# Altium footprint library Mechanical.PcbLib: 23 footprints (part 1 of 2)
Each footprint in its own frame and in the unit in brackets; x right, y up, seen from the top. Pads: shape width x height; smd on the part's side, far side on the other; paste and mask are expansions set on the pad; w line width, h text height; cw(c..) or ccw(c..) is an arc to the next point about the centre after c.
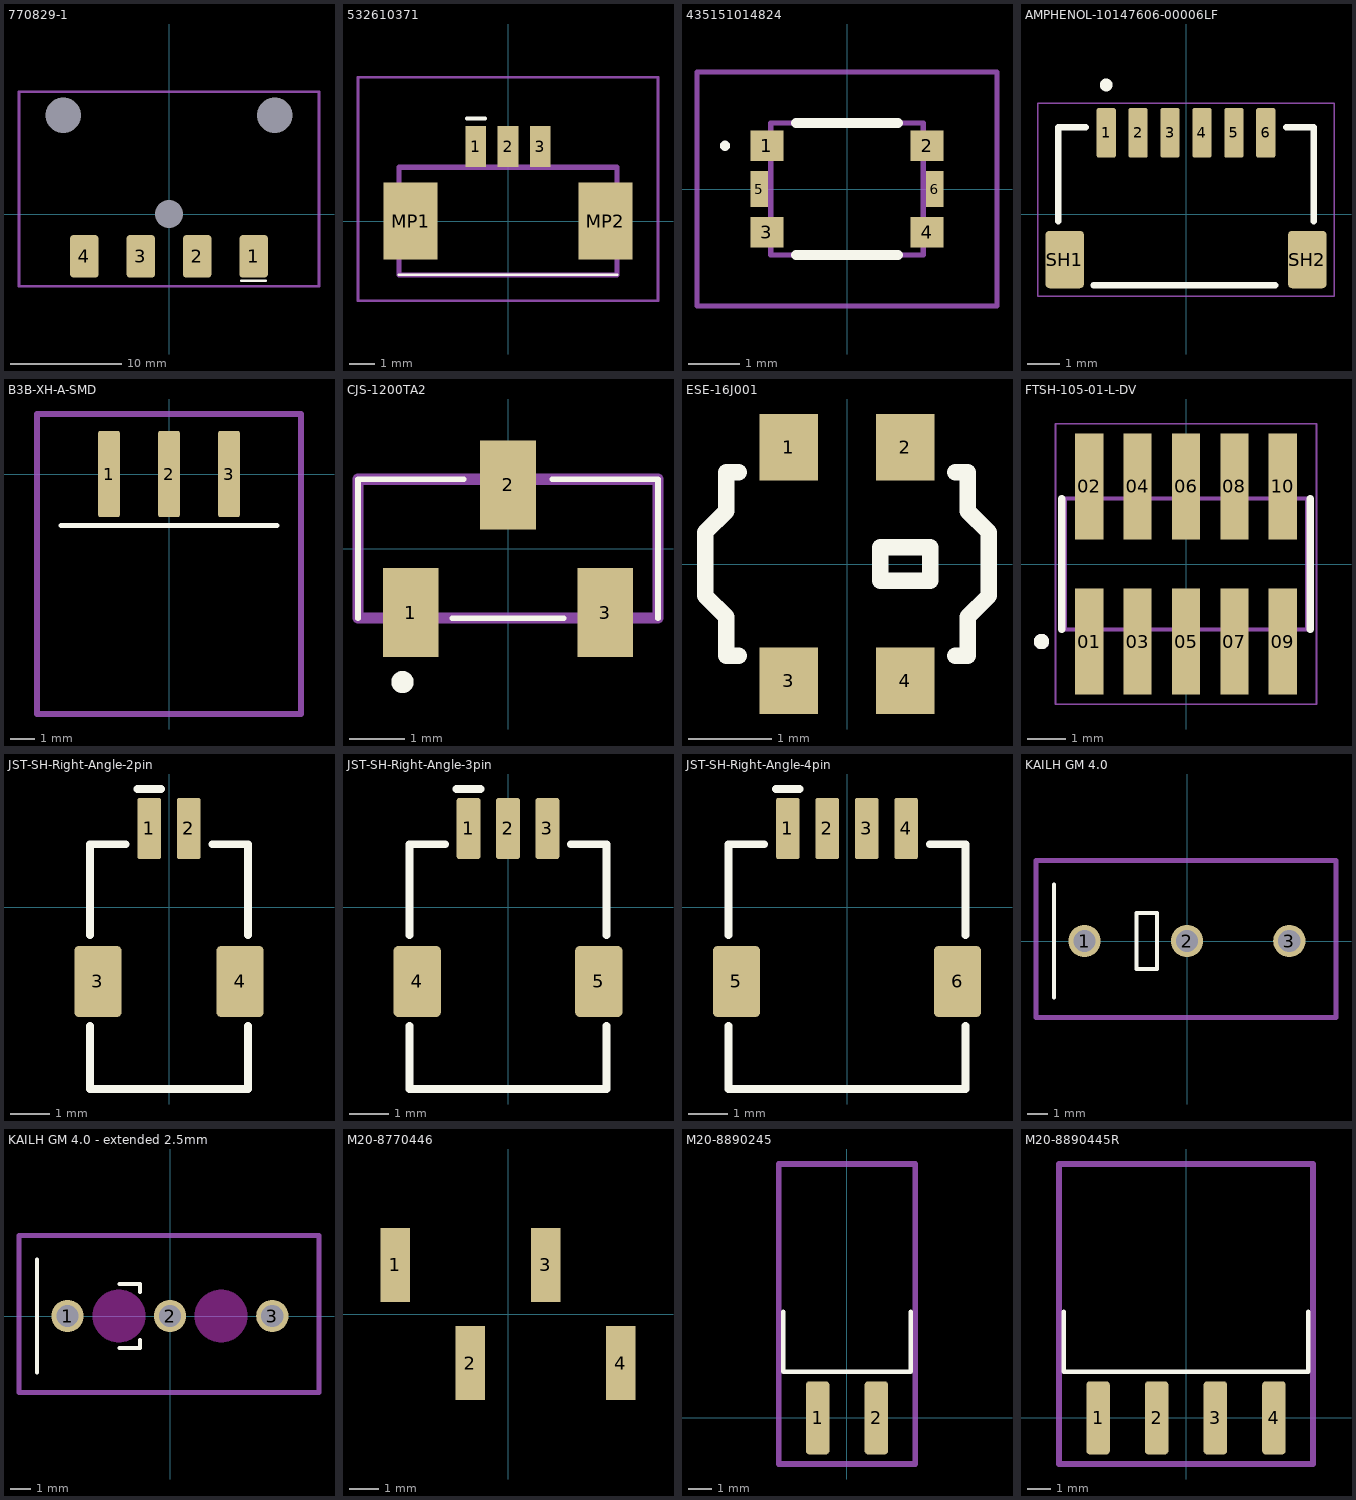
[diagram p0: the footprints below, top view; thin cyan lines are the x and y axes]

## 770829-1 [mm] "Connector Header Surface Mount, Right Angle 4 position 0.200\" (5.08mm)"
pads (7):
  rrect20% 2.54x3.8 smd mask+0.05: 1(7.62,-3.81) 2(2.54,-3.81) 3(-2.54,-3.81) 4(-7.62,-3.81)
  round 0 hole 3.18 mask+0: 7(-9.53,8.89) 7(9.53,8.89)
  round 0 hole 2.54 mask+0: 7(0,0)
Top Overlay:
  lines w0.254: 6.5,-6 8.7,-6
Mechanical 15:
  lines w0.254: -13.5,-6.5 13.5,-6.5 13.5,11 -13.5,11 -13.5,-6.5
3D body "770829-1.stp": height 8.59, standoff -3.68, extent -12.7,-5.042 12.7,10.3

## 532610371 [mm] "Headers & Wire Housings 1.25MM HDR 3 CKT Right-Angle"
pads (5):
  rect 0.8x1.6 smd mask+0.035: 1(-1.25,2.9) 2(0,2.9) 3(1.25,2.9)
  rect 2.1x3 smd mask+0.035: MP1(-3.8,0) MP2(3.8,0)
Top Overlay:
  lines w0.1: -4.25,-2.1 4.25,-2.1
  lines w0.15: -1.6,4 -0.9,4
Mechanical 13:
  lines w0.2: -4.25,-2.1 4.25,-2.1 4.25,2.1 -4.25,2.1 -4.25,-2.1
Mechanical 15:
  lines w0.1: -5.85,-3.1 5.85,-3.1 5.85,5.6 -5.85,5.6 -5.85,-3.1
3D body "53261-0371.stp": height 3.4, standoff 0, extent -4.45,-2.225 4.45,2.975

## 435151014824 [mm]
pads (6):
  rect 0.65x0.6 smd mask+0.04: 1(-1.575,0.85) 2(1.575,0.85) 3(-1.575,-0.85) 4(1.575,-0.85)
  rect 0.35x0.7 smd mask+0.04: 5(-1.725,0) 6(1.725,0)
Top Overlay:
  lines w0.1: -2.4,0.8 cw(c-2.4,0.85) -2.4,0.9 cw(c-2.4,0.85) -2.4,0.8
  lines w0.2: -1,-1.3 1,-1.3 ; -1,1.3 1,1.3
Mechanical 13:
  lines w0.1: -1.5,-1.3 -1.5,1.3 1.5,1.3 1.5,-1.3 -1.5,-1.3
Mechanical 15:
  lines w0.1: -2.95,-2.3 -2.95,2.3 2.95,2.3 2.95,-2.3 -2.95,-2.3
3D body "435151014824.stp": height 1.41, standoff 0, extent -1.75,-1.3 1.75,1.3

## AMPHENOL-10147606-00006LF [mm] "Amphenol,1mm pitch, 6 Pos, 1 Row, SMD, Wire-to-Board, Right Angle, Male"
pads (8):
  rrect20% 0.6x1.55 smd mask+0.05: 1(-2.5,2.545) 2(-1.5,2.545) 3(-0.5,2.545) 4(0.5,2.545) 5(1.5,2.545) 6(2.5,2.545)
  rrect20% 1.2x1.8 smd: SH1(-3.8,-1.425) SH2(3.8,-1.425)
Top Overlay:
  circle w0.2: c-2.5,4.045 r0.1
  lines w0.2: -4,-0.225 -4,2.721 ; -3.998,2.723 -3.14,2.723 ; -2.9,-2.225 2.8,-2.225 ; 3.14,2.723 3.998,2.723 ; 4,-0.225 4,2.721
Mechanical 15:
  lines w0.05: -4.65,-2.575 4.65,-2.575 4.65,3.475 -4.65,3.475 -4.65,-2.575
3D body "step_temp.STEP": height 2.9, standoff 0, extent -4,-2.125 4,2.825

## B3B-XH-A-SMD [mm] "Repursposed as straight, side-looker SMD"
pads (3):
  rrect20% 0.9x3.6 smd mask+0.05: 1(-2.5,0) 2(0,0) 3(2.5,0)
Top Overlay:
  lines w0.2: -4.5,-2.15 4.5,-2.15
Mechanical 15:
  lines w0.254: -5.5,-10 5.5,-10 5.5,2.5 -5.5,2.5 -5.5,-10
3D body "B3B-XH-A.STEP": height 2.88, standoff -2.88, extent -4.95,-9.35 4.95,1.05

## CJS-1200TA2 [mm] "ON-ON Slide Switches smd jumper switch, J hook, w/o detent,non-washable,tape"
pads (3):
  rect 1x1.6 smd: 1(-1.75,-1.15) 2(0,1.15) 3(1.75,-1.15)
Top Overlay:
  lines w0.1: -2.7,-1.25 -2.7,1.25 -0.8,1.25 ; -1,-1.25 1,-1.25 ; 0.8,1.25 2.7,1.25 2.7,-1.25
  lines w0.2: -2,-2.4 ccw(c-1.9,-2.4) -1.8,-2.4 ccw(c-1.9,-2.4) -2,-2.4
Mechanical 15:
  lines w0.2: -2.7,-1.25 2.7,-1.25 2.7,1.25 -2.7,1.25 -2.7,-1.25
3D body "CJS-1200TA2.stp": height 2.52, standoff 0, extent -2.7,-1.4 2.7,1.4

## ESE-16J001 [mm] "1VR Detector Switches, 2.2mmx3.35mm (Height:1.5mm), 250mN. With increased pad height for hand-solderability"
height 1.5
pads (4):
  rect 0.7x0.8 smd: 1(-0.7,1.4) 2(0.7,1.4) 3(-0.7,-1.4) 4(0.7,-1.4)
Top Overlay:
  lines w0.2: -1.3,-1.1 -1.448,-1.1 -1.448,-0.635 -1.702,-0.381 -1.702,0 -1.702,0.381 -1.448,0.635 -1.448,1.1 -1.3,1.1 ; 1.3,-1.1 1.448,-1.1 1.448,-0.635 1.702,-0.381 1.702,0 1.702,0.381 1.448,0.635 1.448,1.1 1.3,1.1 ; 0.4,-0.2 1,-0.2 1,0.2 0.4,0.2 0.4,-0.2
3D body "ESE16J001.step": height 2.47, standoff -0.01, extent -1.675,-1.274 1.675,1.274

## FTSH-105-01-L-DV [mm] "Samtec, 2x5 pin, 1.27mm pitch"
pads (10):
  rect 0.74x2.79 smd: 01(-2.54,-2.035) 02(-2.54,2.035) 03(-1.27,-2.035) 04(-1.27,2.035) 05(0,-2.035) 06(0,2.035) 07(1.27,-2.035) 08(1.27,2.035) 09(2.54,-2.035) 10(2.54,2.035)
Top Overlay:
  circle w0.2: c-3.79,-2.035 r0.1
  lines w0.2: -3.26,-1.715 -3.26,1.715 ; 3.26,-1.715 3.26,1.715
Mechanical 13:
  circle w0.2: c-3.79,-2.035 r0.1
  lines w0.1: -3.175,-1.715 3.175,-1.715 3.175,1.715 -3.175,1.715 -3.175,-1.715
Mechanical 15:
  lines w0.05: -3.425,-3.68 3.425,-3.68 3.425,3.68 -3.425,3.68 -3.425,-3.68
3D body "step_temp.STEP": height 5.97, standoff 0, extent -3.175,-2.921 3.175,2.921

## JST-SH-Right-Angle-2pin [mm] "JST SH 2-pin SMD right angle, 3D model also contains cable connection / 3D model is just a rough approximation"
pads (4):
  rrect20% 0.6x1.55 smd mask+0.05: 1(-0.5,2) 2(0.5,2)
  rrect20% 1.2x1.8 smd mask+0.05: 3(-1.8,-1.875) 4(1.8,-1.875)
Top Overlay:
  lines w0.2: -2,-3 -2,-4.6 2,-4.6 2,-3 ; -2,-0.7 -2,1.6 -1.1,1.6 ; -0.8,3 -0.2,3 ; 1.1,1.6 2,1.6 2,-0.7
3D body "JST-SH-Right-Angle-2pin-off.step": height 2.95, standoff 0.06, extent -2.1,-4.6 2.1,2.361

## JST-SH-Right-Angle-3pin [mm] "JST SH 3-pin SMD right angle, 3D model also contains cable connection / 3D model is just a rough approximation"
pads (5):
  rrect20% 0.6x1.55 smd mask+0.05: 1(-1,2) 2(0,2) 3(1,2)
  rrect20% 1.2x1.8 smd mask+0.05: 4(-2.3,-1.875) 5(2.3,-1.875)
Top Overlay:
  lines w0.2: -2.5,-3 -2.5,-4.6 0,-4.6 2.5,-4.6 2.5,-3 ; -2.5,-0.7 -2.5,1.6 -1.6,1.6 ; -1.3,3 -0.7,3 ; 1.6,1.6 2.5,1.6 2.5,-0.7
3D body "JST-SH-Right-Angle-3pin-off v4.step": height 2.95, standoff 0.06, extent -2.6,-4.6 2.6,2.361

## JST-SH-Right-Angle-4pin [mm] "JST SH 4-pin SMD right angle, 3D model also contains cable connection / 3D model is just a rough approximation"
pads (6):
  rrect20% 0.6x1.55 smd mask+0.05: 1(-1.5,2) 2(-0.5,2) 3(0.5,2) 4(1.5,2)
  rrect20% 1.2x1.8 smd mask+0.05: 5(-2.8,-1.875) 6(2.8,-1.875)
Top Overlay:
  lines w0.2: -3,-3 -3,-4.6 3,-4.6 3,-3 ; -3,-0.7 -3,1.6 -2.1,1.6 ; -1.8,3 -1.2,3 ; 2.1,1.6 3,1.6 3,-0.7
3D body "JST-SH-Right-Angle-4pin-off.step": height 2.95, standoff 0.06, extent -3.1,-4.6 3.1,2.361

## KAILH GM 4.0 [mm] "Gaming mouse micro switch 60M life for computer mice left right button"
pads (3):
  round 1.6 hole 1.1 mask+0.04: 1(-5.09,0) 2(0,0) 3(5.08,0)
Top Overlay:
  lines w0.2: -6.6,-2.8 -6.6,2.8 ; -2.5,-1.4 -1.5,-1.4 -1.5,1.4 -2.5,1.4 -2.5,-1.4
Mechanical 15:
  lines w0.254: -7.5,-3.8 7.4,-3.8 7.4,4 -7.5,4 -7.5,-3.8
3D body "Kailh GM 4.0 CMI126601D01.step": height 7.1, standoff -3.19, extent -6.4,-2.9 6.4,2.9

## KAILH GM 4.0 - extended 2.5mm [mm] "Gaming mouse micro switch 60M life for computer mice left right button. With vertical spacer to be used with (TBA/12mm) encoder heights."
pads (3):
  round 1.6 hole 1.1 mask+0.04: 1(-5.09,0) 2(0,0) 3(5.08,0)
Top Overlay:
  lines w0.2: -6.6,-2.8 -6.6,2.8 ; -2.5,-1.6 -1.5,-1.6 -1.5,-1.2 ; -2.5,1.6 -1.5,1.6 -1.5,1.2
Keep-Out Layer:
  board cut-out: -2.54,-1.3 -2.668,-1.3 -2.919,-1.25 -3.156,-1.152 -3.369,-1.01 -3.55,-0.829 -3.692,-0.616 -3.79,-0.379 -3.84,-0.128 -3.84,0 -3.84,0.128 -3.79,0.379 -3.692,0.616 -3.55,0.829 -3.369,1.01 -3.156,1.152 -2.919,1.25 -2.668,1.3 -2.54,1.3 -2.412,1.3 -2.161,1.25 -1.924,1.152 -1.711,1.01 -1.53,0.829 -1.388,0.616 -1.29,0.379 -1.24,0.128 -1.24,0 -1.24,-0.128 -1.29,-0.379 -1.388,-0.616 -1.53,-0.829 -1.711,-1.01 -1.924,-1.152 -2.161,-1.25 -2.412,-1.3
  board cut-out: 1.24,0 1.24,-0.128 1.29,-0.379 1.388,-0.616 1.53,-0.829 1.711,-1.01 1.924,-1.152 2.161,-1.25 2.412,-1.3 2.54,-1.3 2.668,-1.3 2.919,-1.25 3.156,-1.152 3.369,-1.01 3.55,-0.829 3.692,-0.616 3.79,-0.379 3.84,-0.128 3.84,0 3.84,0.128 3.79,0.379 3.692,0.616 3.55,0.829 3.369,1.01 3.156,1.152 2.919,1.25 2.668,1.3 2.54,1.3 2.412,1.3 2.161,1.25 1.924,1.152 1.711,1.01 1.53,0.829 1.388,0.616 1.29,0.379 1.24,0.128
Mechanical 15:
  lines w0.254: -7.5,-3.8 -7.5,4 7.4,4 7.4,-3.8 -7.5,-3.8
3D body "Mouse switch spacer 2.5mm.step": height 9.6, standoff -1.6, extent -6.4,-2.9 6.4,2.9

## M20-8770446 [mm] "Headers & Wire Housings 04 SIL VERTICAL SMT HEADER TIN"
height 10
pads (4):
  rect 1x2.51 smd: 1(-3.81,1.655) 2(-1.27,-1.655) 3(1.27,1.655) 4(3.81,-1.655)
3D body "M20-8770446 v4.step": height 9.93, standoff 0, extent -5.07,-2.54 5.09,2.54

## M20-8890245 [mm] "CONN HEADER SMD R/A 2POS 2.54MM"
pads (2):
  rrect30% 1.02x3.17 smd mask+0.05: 1(-1.27,0) 2(1.27,0)
Top Overlay:
  lines w0.2: -2.76,4.6 -2.76,2 0,2 2.76,2 2.76,4.6
Mechanical 15:
  lines w0.254: -2.96,-2 2.96,-2 2.96,11 -2.96,11 -2.96,-2
3D body "2x v1.step": height 2.5, standoff 0, extent -2.524,-0.8 2.556,10.7

## M20-8890445R [mm] "CONN HEADER SMD R/A 4POS 2.54MM"
pads (4):
  rrect30% 1.02x3.17 smd mask+0.05: 1(-3.81,0) 2(-1.27,0) 3(1.27,0) 4(3.81,0)
Top Overlay:
  lines w0.2: -5.3,4.6 -5.3,2 0,2 5.3,2 5.3,4.6
Mechanical 15:
  lines w0.254: -5.5,-2 5.5,-2 5.5,11 -5.5,11 -5.5,-2
3D body "4x v1.step": height 2.5, standoff 0, extent -5.066,-0.8 5.094,10.7